# Altium integrated library VIETTIEN.IntLib: 194 symbols (part 9 of 9)

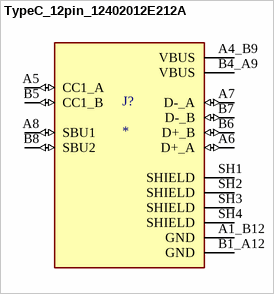
[diagram p184: symbol TypeC_12pin_12402012E212A]

## TypeC_12pin_12402012E212A
designator J?
USB2.0, Type C, Top mount, CH 1.68mm, Dual Row SMT; MP: 12402012E212A; MF: Amphenol ICC (Commercial Products); Price: None; Package: None; Availability: In Stock; SnapEDA_Link: https://www.snapeda.com/parts/12402012E212A/Amphenol/view-part/?ref=snap; Value: *; Check_prices: https://www.snapeda.com/parts/12402012E212A/Amphenol/view-part/?ref=eda; Purchase-URL: https://pricing.snapeda.com/search/part/12402012E212A/?ref=eda
footprint TypeC_12pin_12402012E212A
pins: A1_B12 GND (power), A4_B9 VBUS (power), A5 CC1_A (io), A6 D+_A (io), A7 D-_A (io), A8 SBU1 (io), B1_A12 GND (power), B4_A9 VBUS (power), B5 CC1_B (io), B6 D+_B (io), B7 D-_B (io), B8 SBU2 (io), SH1 SHIELD, SH2 SHIELD, SH3 SHIELD, SH4 SHIELD


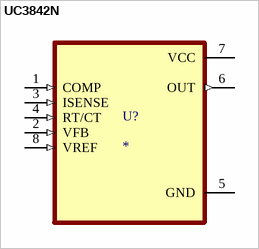
[diagram p185: symbol UC3842N]

## UC3842N
designator U?
Single ended 500KHz current mode PWM controller with 16V/10V UVLO 100% duty cycle, 0C to 70C; MF: Texas Instruments; MP: UC3842N; SnapEDA_Link: https://www.snapeda.com/parts/UC3842N/Texas+Instruments/view-part/?ref=snap; Package: PDIP-8 Texas; Value: *; Check_prices: https://www.snapeda.com/parts/UC3842N/Texas+Instruments/view-part/?ref=eda
footprint DIP794W45P254L959H508Q8
pins: 1 COMP (in), 2 VFB (in), 3 ISENSE (in), 4 RT/CT (in), 5 GND (power), 6 OUT (out), 7 VCC (power), 8 VREF (in)


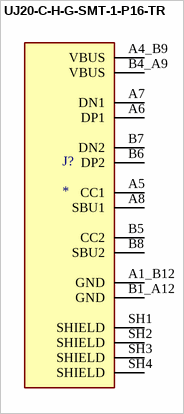
[diagram p186: symbol UJ20-C-H-G-SMT-1-P16-TR]

## UJ20-C-H-G-SMT-1-P16-TR
designator J?
USB-C (USB TYPE-C) USB 2.0 Receptacle Connector 24 (16+8 Dummy) Position Surface Mount, Right Angle; Through Hole; MF: Same Sky; MP: UJ20-C-H-G-SMT-1-P16-TR; SnapEDA_Link: https://www.snapeda.com/parts/UJ20-C-H-G-SMT-1-P16-TR/Same+Sky/view-part/?ref=snap; Package: None; Value: *; Check_prices: https://www.snapeda.com/parts/UJ20-C-H-G-SMT-1-P16-TR/Same+Sky/view-part/?ref=eda
footprint SAMESKY_UJ20-C-H-G-SMT-1-P16-TR
pins: A1_B12 GND, A4_B9 VBUS, A5 CC1, A6 DP1, A7 DN1, A8 SBU1, B1_A12 GND, B4_A9 VBUS, B5 CC2, B6 DP2, B7 DN2, B8 SBU2, SH1 SHIELD, SH2 SHIELD, SH3 SHIELD, SH4 SHIELD


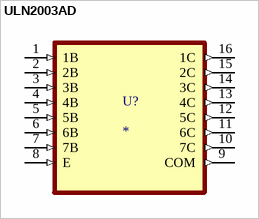
[diagram p187: symbol ULN2003AD]

## ULN2003AD
designator U?
50-V, 7-ch darlington transistor array, -20C to 70C; MF: Texas Instruments; MP: ULN2003AD; SnapEDA_Link: https://www.snapeda.com/parts/ULN2003AD/Texas+Instruments/view-part/?ref=snap; Package: SOIC-16 Texas Instruments; Value: *; Check_prices: https://www.snapeda.com/parts/ULN2003AD/Texas+Instruments/view-part/?ref=eda
footprint SOIC127P600X175-16N
pins: 1 1B (in), 2 2B (in), 3 3B (in), 4 4B (in), 5 5B (in), 6 6B (in), 7 7B (in), 8 E (in), 9 COM (out), 10 7C (out), 11 6C (out), 12 5C (out), 13 4C (out), 14 3C (out), 15 2C (out), 16 1C (out)


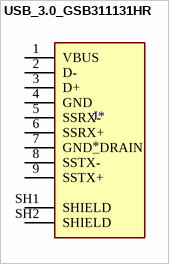
[diagram p188: symbol USB_3.0_GSB311131HR]

## USB_3.0_GSB311131HR
designator J*
USB-A _USB TYPE-A_ USB 3.0 _USB 3.1 Gen 1, Superspeed_ Receptacle Connector 9 Position Through Hole, Right Angle / GSB311131HR; MF: Amphenol ICC; Package: None; Digi-Key_Purchase_URL: https://www.digikey.ru/product-detail/en/amphenol-icc-commercial-products/GSB311131HR/GSB311131HR-ND/2187173?utm_source=snapeda&utm_medium=aggregator&utm_campaign=symbol; Value: *; MP: GSB311131HR; SnapEDA_Link: https://www.snapeda.com/parts/GSB311131HR/Amphenol%20FCI/view-part/229215/?ref=snap; Digi-Key_Part_Number: GSB311131HR-ND
footprint USB 3.0
pins: 1 VBUS, 2 D-, 3 D+, 4 GND, 5 SSRX-, 6 SSRX+, 7 GND_DRAIN, 8 SSTX-, 9 SSTX+, SH1 SHIELD, SH2 SHIELD


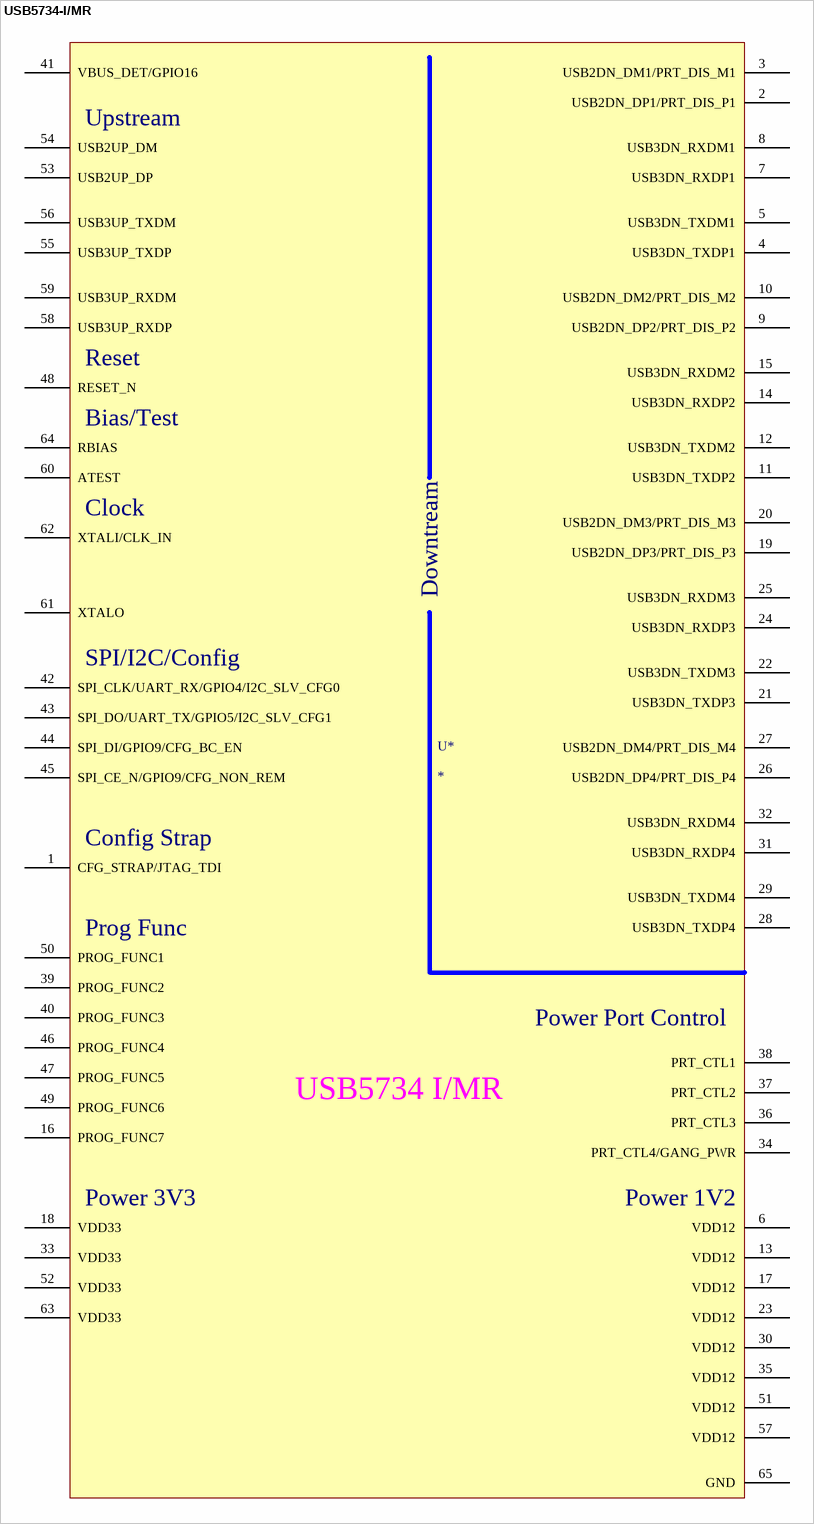
[diagram p189: symbol USB5734-I/MR]

## USB5734-I/MR
designator U*
USB5734-I/MR / USB Hub Controller USB 3.0 I2C, SPI, UART Interface 64-VQFN (9x9)
footprint USB5734-I/MR
pins: 1 CFG_STRAP/JTAG_TDI, 2 USB2DN_DP1/PRT_DIS_P1, 3 USB2DN_DM1/PRT_DIS_M1, 4 USB3DN_TXDP1, 5 USB3DN_TXDM1, 6 VDD12, 7 USB3DN_RXDP1, 8 USB3DN_RXDM1, 9 USB2DN_DP2/PRT_DIS_P2, 10 USB2DN_DM2/PRT_DIS_M2, 11 USB3DN_TXDP2, 12 USB3DN_TXDM2, 13 VDD12, 14 USB3DN_RXDP2, 15 USB3DN_RXDM2, 16 PROG_FUNC7, 17 VDD12, 18 VDD33, 19 USB2DN_DP3/PRT_DIS_P3, 20 USB2DN_DM3/PRT_DIS_M3, 21 USB3DN_TXDP3, 22 USB3DN_TXDM3, 23 VDD12, 24 USB3DN_RXDP3, 25 USB3DN_RXDM3, 26 USB2DN_DP4/PRT_DIS_P4, 27 USB2DN_DM4/PRT_DIS_M4, 28 USB3DN_TXDP4, 29 USB3DN_TXDM4, 30 VDD12, 31 USB3DN_RXDP4, 32 USB3DN_RXDM4, 33 VDD33, 34 PRT_CTL4/GANG_PWR, 35 VDD12, 36 PRT_CTL3, 37 PRT_CTL2, 38 PRT_CTL1, 39 PROG_FUNC2, 40 PROG_FUNC3, 41 VBUS_DET/GPIO16, 42 SPI_CLK/UART_RX/GPIO4/I2C_SLV_CFG0, 43 SPI_DO/UART_TX/GPIO5/I2C_SLV_CFG1, 44 SPI_DI/GPIO9/CFG_BC_EN, 45 SPI_CE_N/GPIO9/CFG_NON_REM, 46 PROG_FUNC4, 47 PROG_FUNC5, 48 RESET_N, 49 PROG_FUNC6, 50 PROG_FUNC1, 51 VDD12, 52 VDD33, 53 USB2UP_DP, 54 USB2UP_DM, 55 USB3UP_TXDP, 56 USB3UP_TXDM, 57 VDD12, 58 USB3UP_RXDP, 59 USB3UP_RXDM, 60 ATEST, 61 XTALO, 62 XTALI/CLK_IN, 63 VDD33, 64 RBIAS, 65 GND
text: Upstream; Reset; Bias/Test; Clock; Downtream; SPI/I2C/Config; Config Strap; Prog Func; Power Port Control; USB5734 I/MR; Power 3V3; Power 1V2


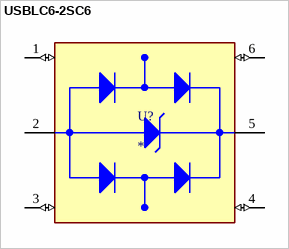
[diagram p190: symbol USBLC6-2SC6]

## USBLC6-2SC6
designator U?
17V Clamp 5A (8/20Âµs) Ipp Tvs Diode Surface Mount SOT-23-6; MF: STMicroelectronics; MP: USBLC6-2SC6; Value: *; SnapEDA_Link: https://www.snapeda.com/parts/USBLC6-2SC6/STMicroelectronics/view-part/?ref=snap; Check_prices: https://www.snapeda.com/parts/USBLC6-2SC6/STMicroelectronics/view-part/?ref=eda; Purchase-URL: https://pricing.snapeda.com/search/part/USBLC6-2SC6/?ref=eda; Price: None; Availability: In Stock; Package: SOT-23-6 STMicroelectronics
footprint USBLC6-2SC6
pins: 1 I/O1_IN (io), 2 GND (power), 3 I/O2_IN (io), 4 I/O2_OUT (io), 5 VBUS (power), 6 I/O1_OUT (io)


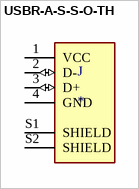
[diagram p191: symbol USBR-A-S-S-O-TH]

## USBR-A-S-S-O-TH
designator J
USB-A _USB TYPE-A_ USB 2.0 Receptacle Connector 4 Position Through Hole, Right Angle; MF: Samtec; MP: USBR-A-S-S-O-TH; SnapEDA_Link: https://www.snapeda.com/parts/USBR-A-S-S-O-TH/Samtec%20Inc./view-part/279681/?ref=snap; Availability: Unavailable; Price: None; Package: None; Value: *
footprint SAMTEC_USBR-A-S-S-O-TH
pins: 1 VCC (power), 2 D- (io), 3 D+ (io), 4 GND (power), S1 SHIELD, S2 SHIELD


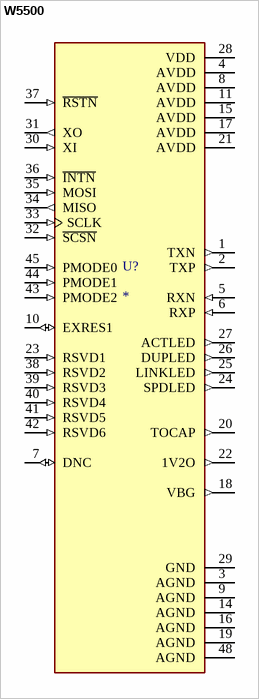
[diagram p192: symbol W5500]

## W5500
designator U?
Hardwired TCP/IP embedded Ethernet controller; MP: W5500; Availability: Unavailable; Value: *; Price: None; Package: None
footprint QFP50P900X900X160-48N
footprint QFP50P900X900X160-48N
pins: 1 TXN (out), 2 TXP (out), 3 AGND (power), 4 AVDD (power), 5 RXN (in), 6 RXP (in), 7 DNC (io), 8 AVDD (power), 9 AGND (power), 10 EXRES1 (io), 11 AVDD (power), 14 AGND (power), 15 AVDD (power), 16 AGND (power), 17 AVDD (power), 18 VBG (out), 19 AGND (power), 20 TOCAP (out), 21 AVDD (power), 22 1V2O (out), 23 RSVD1 (in), 24 SPDLED (out), 25 LINKLED (out), 26 DUPLED (out), 27 ACTLED (out), 28 VDD (power), 29 GND, 30 XI (in), 31 XO (out), 32 ~{SCSN} (in), 33 SCLK (in), 34 MISO (out), 35 MOSI (in), 36 ~{INTN} (in), 37 ~{RSTN} (in), 38 RSVD2 (in), 39 RSVD3 (in), 40 RSVD4 (in), 41 RSVD5 (in), 42 RSVD6 (in), 43 PMODE2 (in), 44 PMODE1 (in), 45 PMODE0 (in), 48 AGND (power)


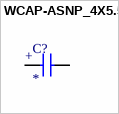
[diagram p193: symbol WCAP-ASNP_4X5.5]

## WCAP-ASNP_4X5.5
designator C?
CAP ALUM 10UF 20% 16V SMD; MF: WÃ¼rth Elektronik; MP: 865250340003; SnapEDA_Link: https://www.snapeda.com/parts/865250340003/W%25C3%25BCrth+Elektronik+Midcom/view-part/?ref=snap; Package: Radial WÃ¼rth Elektronik; Value: *; Check_prices: https://www.snapeda.com/parts/865250340003/W%25C3%25BCrth+Elektronik+Midcom/view-part/?ref=eda
footprint WCAP-ASNP_4X5.5(DXL)
pins: 1, 2
text: +


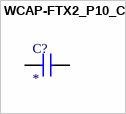
[diagram p194: symbol WCAP-FTX2_P10_CS]

## WCAP-FTX2_P10_CS
designator C?
WCAP-FTX2 Film Capacitor 100nF 275Vac ¦ Wurth Electronics 890324023023CS; MF: WÃ¼rth Elektronik; SnapEDA_Link: https://www.snapeda.com/parts/890324023023CS/W%25C3%25BCrth+Elektronik+Midcom/view-part/?ref=snap; Package: Radial WÃ¼rth Elektronik; Value: *; MP: 890324023023CS; Check_prices: https://www.snapeda.com/parts/890324023023CS/W%25C3%25BCrth+Elektronik+Midcom/view-part/?ref=eda
footprint WCAP-FTX2_P10L13W7H13_CS
pins: 1, 2


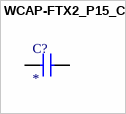
[diagram p195: symbol WCAP-FTX2_P15_CS]

## WCAP-FTX2_P15_CS
designator C?
WCAP-FTX2 Film Capacitor 100nF 275Vac ¦ Wurth Electronics 890324025017CS; MF: WÃ¼rth Elektronik; SnapEDA_Link: https://www.snapeda.com/parts/890324025017CS/W%25C3%25BCrth+Elektronik+Midcom/view-part/?ref=snap; Package: Radial Wurth Electronics; Value: *; MP: 890324025017CS; Check_prices: https://www.snapeda.com/parts/890324025017CS/W%25C3%25BCrth+Elektronik+Midcom/view-part/?ref=eda
footprint WCAP-FTX2_P15L18W6H12_CS
pins: 1, 2


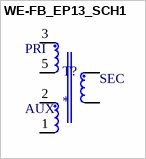
[diagram p196: symbol WE-FB_EP13_SCH1]

## WE-FB_EP13_SCH1
designator T?
1.5:1 Surface Mount Flyback Transformer, 9ÂµH, 0.034O ¦ Wurth Electronics 750311624; MF: WÃ¼rth Elektronik; SnapEDA_Link: https://www.snapeda.com/parts/750311624/W%25C3%25BCrth+Elektronik+Midcom/view-part/?ref=snap; Package: None; Value: *; MP: 750311624; Check_prices: https://www.snapeda.com/parts/750311624/W%25C3%25BCrth+Elektronik+Midcom/view-part/?ref=eda
footprint WE-FB_EP13_P16.36
pins: 1 4, 2 3, 3 1, 5 2, 6, 7 6, 9 5, 10 5
text: PRI; SEC; AUX


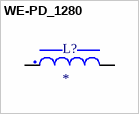
[diagram p197: symbol WE-PD_1280]

## WE-PD_1280
designator L?
Size 1280; L = 10 ÂµH Â±20%; IR = 6.2 A; Isat = 7,5 A; RDC = 22 mâWE-PD_1280; MF: Wurth Electronics; MP: 74477010; SnapEDA_Link: https://www.snapeda.com/parts/74477010/Wurth+Electronics/view-part/?ref=snap; Package: Nonstandard WÃ¼rth Elektronik; Value: *; Check_prices: https://www.snapeda.com/parts/74477010/Wurth+Electronics/view-part/?ref=eda
footprint WE-PD_1280
pins: 1, 2


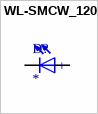
[diagram p198: symbol WL-SMCW_1206]

## WL-SMCW_1206
designator D?
1206, Blue Typ.(@20mA): 470nm, 145mcd, 3.2V, 140Â° InGaN; MF: Wurth Electronics; MP: 150120BS75000; SnapEDA_Link: https://www.snapeda.com/parts/150120BS75000/Wurth+Electronics/view-part/?ref=snap; Package: 1206 Wurth Electronics; Value: *; Check_prices: https://www.snapeda.com/parts/150120BS75000/Wurth+Electronics/view-part/?ref=eda
footprint WL-SMCW_1206
pins: 1 NEG, 2 POS
text: +